# Altium footprint library WR-TBL_Pluggable Connector_5.08mm.PcbLib: 295 footprints (part 17 of 19)
Each footprint in its own frame and in the unit in brackets; x right, y up, seen from the top. Pads: shape width x height; smd on the part's side, far side on the other; paste and mask are expansions set on the pad; w line width, h text height; cw(c..) or ccw(c..) is an arc to the next point about the centre after c.
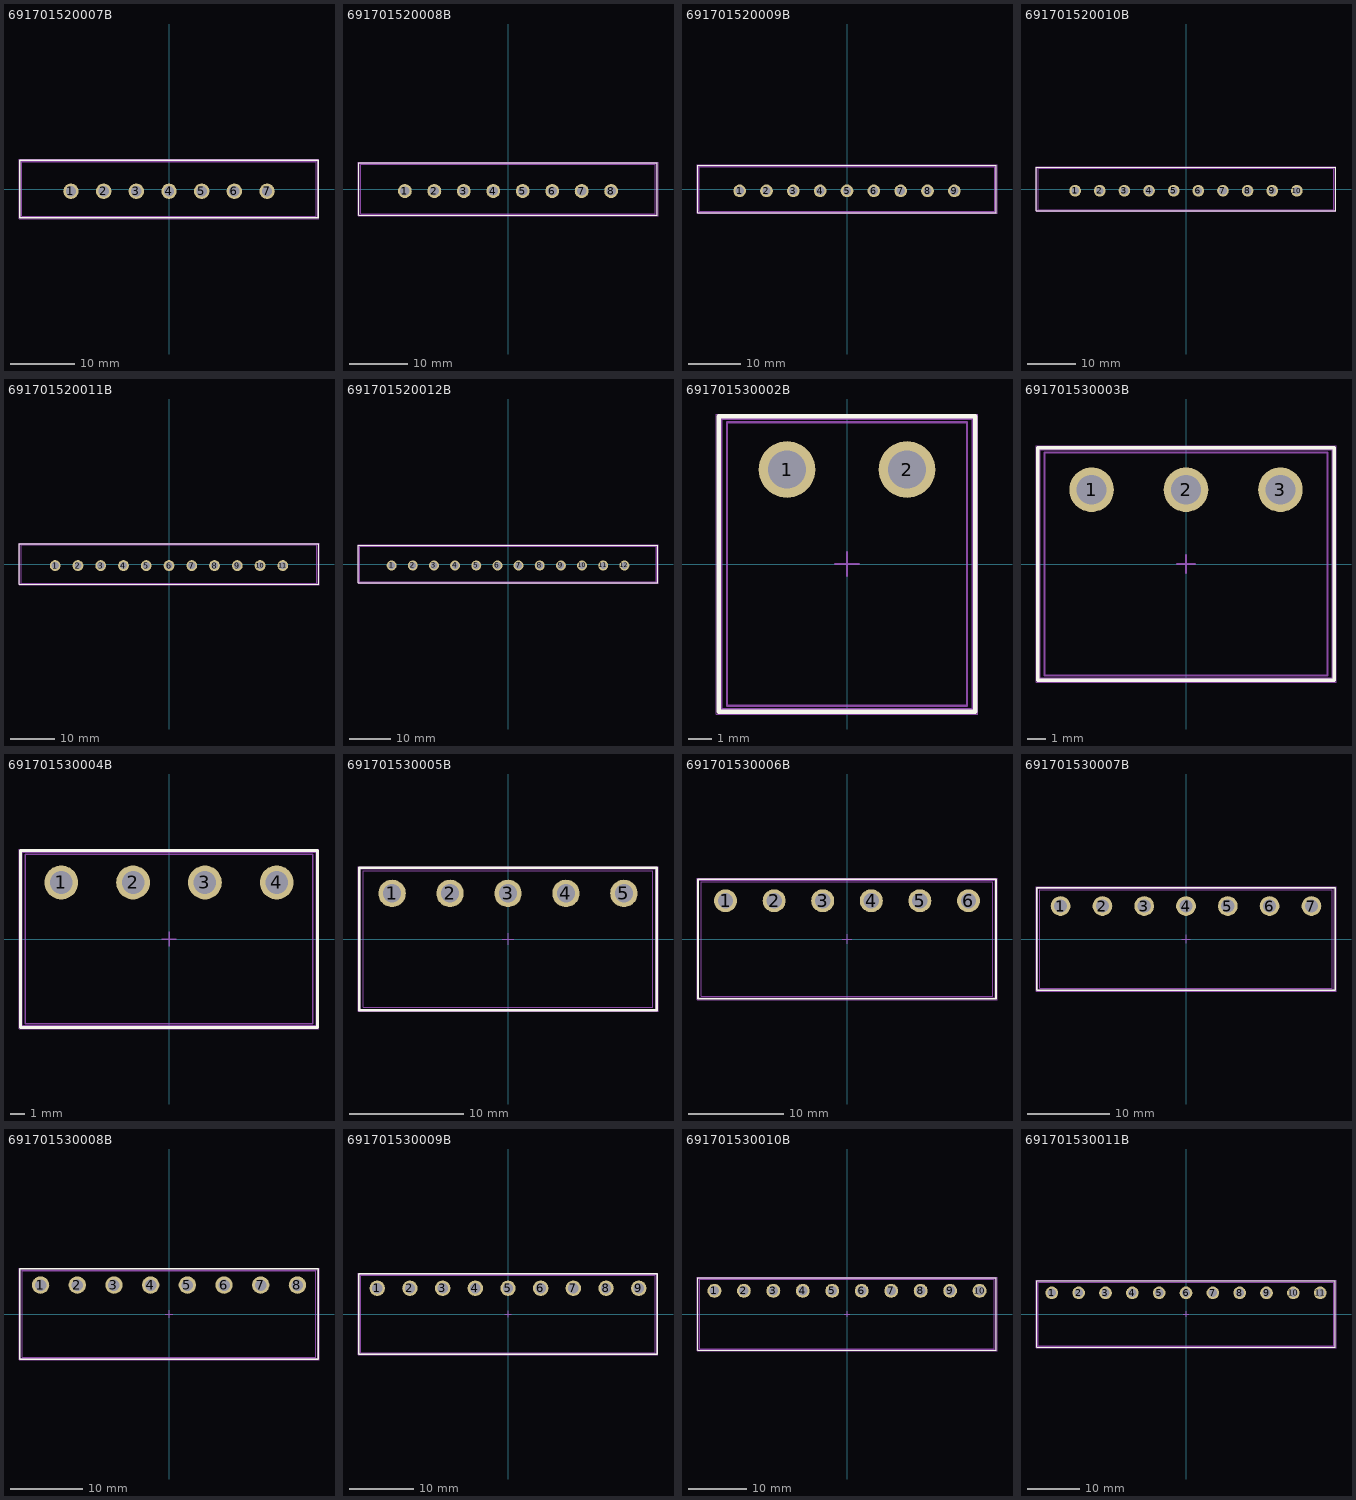
[diagram p16: the footprints below, top view; thin cyan lines are the x and y axes]

## 691701520007B [mm] "THR - 5,08mm - PCB Vertical Flange - 07p"
height 12
pads (7):
  round 2.4 hole 1.6: 1(-15.24,-0.35) 2(-10.16,-0.35) 3(-5.08,-0.35) 4(0,-0.35) 5(5.08,-0.35) 6(10.16,-0.35) 7(15.24,-0.35)
Top Overlay:
  lines w0.2: -23.21,-4.5 23.21,-4.5 23.21,4.5 -23.21,4.5 -23.21,-4.5
Top Paste:
  region: 13.24,1.5 17.24,1.5 17.24,-2.2 13.24,-2.2
  region: 8.16,1.5 12.16,1.5 12.16,-2.2 8.16,-2.2
  region: 3.08,1.5 7.08,1.5 7.08,-2.2 3.08,-2.2
  region: -2,1.5 2,1.5 2,-2.2 -2,-2.2
  region: -7.08,1.5 -3.08,1.5 -3.08,-2.2 -7.08,-2.2
  region: -12.16,1.5 -8.16,1.5 -8.16,-2.2 -12.16,-2.2
  region: -17.24,1.5 -13.24,1.5 -13.24,-2.2 -17.24,-2.2
Assembly Notes:
  text "Stencil thickness : 120 μm" at -5.156,-5.301 h1
Top Assembly:
  lines w0.1: -23.11,-4.4 23.11,-4.4 23.11,4.4 -23.11,4.4 -23.11,-4.4
Top Designator:
  text ".Designator" at -3.647,-0.357 h1
Top 3D Body:
  lines w0.1: -22.86,-4.25 22.86,-4.25 22.86,4.25 -22.86,4.25 -22.86,-4.25
Top Courtyard:
  lines w0.05: -23.31,-4.6 -23.31,4.6 23.31,4.6 23.31,-4.6 -23.31,-4.6
3D body "691701520007B.stp": height 12.11, standoff -2.5, extent -22.86,-4.25 22.86,4.25

## 691701520008B [mm] "THR - 5,08mm - PCB Vertical Flange - 08p"
height 12
pads (8):
  round 2.4 hole 1.6: 1(-17.78,-0.35) 2(-12.7,-0.35) 3(-7.62,-0.35) 4(-2.54,-0.35) 5(2.54,-0.35) 6(7.62,-0.35) 7(12.7,-0.35) 8(17.78,-0.35)
Top Overlay:
  lines w0.2: -25.75,-4.5 25.75,-4.5 25.75,4.5 -25.75,4.5 -25.75,-4.5
Top Paste:
  region: 15.78,1.5 19.78,1.5 19.78,-2.2 15.78,-2.2
  region: 10.7,1.5 14.7,1.5 14.7,-2.2 10.7,-2.2
  region: 5.62,1.5 9.62,1.5 9.62,-2.2 5.62,-2.2
  region: 0.54,1.5 4.54,1.5 4.54,-2.2 0.54,-2.2
  region: -4.54,1.5 -0.54,1.5 -0.54,-2.2 -4.54,-2.2
  region: -9.62,1.5 -5.62,1.5 -5.62,-2.2 -9.62,-2.2
  region: -14.7,1.5 -10.7,1.5 -10.7,-2.2 -14.7,-2.2
  region: -19.78,1.5 -15.78,1.5 -15.78,-2.2 -19.78,-2.2
Assembly Notes:
  text "Stencil thickness : 120 μm" at -5.156,-5.301 h1
Top Assembly:
  lines w0.1: -25.65,-4.4 25.65,-4.4 25.65,4.4 -25.65,4.4 -25.65,-4.4
Top Designator:
  text ".Designator" at -3.647,-0.357 h1
Top 3D Body:
  lines w0.1: -25.4,-4.25 25.4,-4.25 25.4,4.25 -25.4,4.25 -25.4,-4.25
Top Courtyard:
  lines w0.05: -25.85,-4.6 -25.85,4.6 25.85,4.6 25.85,-4.6 -25.85,-4.6
3D body "691701520008B.stp": height 12.11, standoff -2.5, extent -25.4,-4.25 25.4,4.25

## 691701520009B [mm] "THR - 5,08mm - PCB Vertical Flange - 09p"
height 12
pads (9):
  round 2.4 hole 1.6: 1(-20.32,-0.35) 2(-15.24,-0.35) 3(-10.16,-0.35) 4(-5.08,-0.35) 5(0,-0.35) 6(5.08,-0.35) 7(10.16,-0.35) 8(15.24,-0.35) 9(20.32,-0.35)
Top Overlay:
  lines w0.2: -28.29,-4.5 28.29,-4.5 28.29,4.5 -28.29,4.5 -28.29,-4.5
Top Paste:
  region: -22.32,1.5 -18.32,1.5 -18.32,-2.2 -22.32,-2.2
  region: -17.24,1.5 -13.24,1.5 -13.24,-2.2 -17.24,-2.2
  region: -12.16,1.5 -8.16,1.5 -8.16,-2.2 -12.16,-2.2
  region: -7.08,1.5 -3.08,1.5 -3.08,-2.2 -7.08,-2.2
  region: -2,1.5 2,1.5 2,-2.2 -2,-2.2
  region: 3.08,1.5 7.08,1.5 7.08,-2.2 3.08,-2.2
  region: 8.16,1.5 12.16,1.5 12.16,-2.2 8.16,-2.2
  region: 13.24,1.5 17.24,1.5 17.24,-2.2 13.24,-2.2
  region: 18.32,1.5 22.32,1.5 22.32,-2.2 18.32,-2.2
Assembly Notes:
  text "Stencil thickness : 120 μm" at -5.156,-5.301 h1
Top Assembly:
  lines w0.1: -28.19,-4.4 28.19,-4.4 28.19,4.4 -28.19,4.4 -28.19,-4.4
Top Designator:
  text ".Designator" at -3.647,-0.357 h1
Top 3D Body:
  lines w0.1: -27.94,-4.25 27.94,-4.25 27.94,4.25 -27.94,4.25 -27.94,-4.25
Top Courtyard:
  lines w0.05: -28.39,-4.6 -28.39,4.6 28.39,4.6 28.39,-4.6 -28.39,-4.6
3D body "691701520009B.stp": height 12.11, standoff -2.5, extent -27.94,-4.25 27.94,4.25

## 691701520010B [mm] "THR - 5,08mm - PCB Vertical Flange - 10p"
height 12
pads (10):
  round 2.4 hole 1.6: 1(-22.86,-0.35) 2(-17.78,-0.35) 3(-12.7,-0.35) 4(-7.62,-0.35) 5(-2.54,-0.35) 6(2.54,-0.35) 7(7.62,-0.35) 8(12.7,-0.35) 9(17.78,-0.35) 10(22.86,-0.35)
Top Overlay:
  lines w0.2: -30.83,-4.5 30.83,-4.5 30.83,4.5 -30.83,4.5 -30.83,-4.5
Top Paste:
  region: -24.86,1.5 -20.86,1.5 -20.86,-2.2 -24.86,-2.2
  region: -19.78,1.5 -15.78,1.5 -15.78,-2.2 -19.78,-2.2
  region: -14.7,1.5 -10.7,1.5 -10.7,-2.2 -14.7,-2.2
  region: -9.62,1.5 -5.62,1.5 -5.62,-2.2 -9.62,-2.2
  region: -4.54,1.5 -0.54,1.5 -0.54,-2.2 -4.54,-2.2
  region: 0.54,1.5 4.54,1.5 4.54,-2.2 0.54,-2.2
  region: 5.62,1.5 9.62,1.5 9.62,-2.2 5.62,-2.2
  region: 10.7,1.5 14.7,1.5 14.7,-2.2 10.7,-2.2
  region: 15.78,1.5 19.78,1.5 19.78,-2.2 15.78,-2.2
  region: 20.86,1.5 24.86,1.5 24.86,-2.2 20.86,-2.2
Assembly Notes:
  text "Stencil thickness : 120 μm" at -5.156,-5.301 h1
Top Assembly:
  lines w0.1: -30.73,-4.4 30.73,-4.4 30.73,4.4 -30.73,4.4 -30.73,-4.4
Top Designator:
  text ".Designator" at -3.647,-0.357 h1
Top 3D Body:
  lines w0.1: -30.48,-4.25 30.48,-4.25 30.48,4.25 -30.48,4.25 -30.48,-4.25
Top Courtyard:
  lines w0.05: -30.93,-4.6 -30.93,4.6 30.93,4.6 30.93,-4.6 -30.93,-4.6
3D body "691701520010B.stp": height 12.11, standoff -2.5, extent -30.48,-4.25 30.48,4.25

## 691701520011B [mm] "THR - 5,08mm - PCB Vertical Flange - 11p"
height 12
pads (11):
  round 2.4 hole 1.6: 1(-25.4,-0.35) 2(-20.32,-0.35) 3(-15.24,-0.35) 4(-10.16,-0.35) 5(-5.08,-0.35) 6(0,-0.35) 7(5.08,-0.35) 8(10.16,-0.35) 9(15.24,-0.35) 10(20.32,-0.35) 11(25.4,-0.35)
Top Overlay:
  lines w0.2: -33.37,-4.5 33.37,-4.5 33.37,4.5 -33.37,4.5 -33.37,-4.5
Top Paste:
  region: -27.4,1.5 -23.4,1.5 -23.4,-2.2 -27.4,-2.2
  region: -22.32,1.5 -18.32,1.5 -18.32,-2.2 -22.32,-2.2
  region: -17.24,1.5 -13.24,1.5 -13.24,-2.2 -17.24,-2.2
  region: -12.16,1.5 -8.16,1.5 -8.16,-2.2 -12.16,-2.2
  region: -7.08,1.5 -3.08,1.5 -3.08,-2.2 -7.08,-2.2
  region: -2,1.5 2,1.5 2,-2.2 -2,-2.2
  region: 3.08,1.5 7.08,1.5 7.08,-2.2 3.08,-2.2
  region: 8.16,1.5 12.16,1.5 12.16,-2.2 8.16,-2.2
  region: 13.24,1.5 17.24,1.5 17.24,-2.2 13.24,-2.2
  region: 18.32,1.5 22.32,1.5 22.32,-2.2 18.32,-2.2
  region: 23.4,1.5 27.4,1.5 27.4,-2.2 23.4,-2.2
Assembly Notes:
  text "Stencil thickness : 120 μm" at -5.156,-5.301 h1
Top Assembly:
  lines w0.1: -33.27,-4.4 33.27,-4.4 33.27,4.4 -33.27,4.4 -33.27,-4.4
Top Designator:
  text ".Designator" at -3.647,-0.357 h1
Top 3D Body:
  lines w0.1: -33.02,-4.25 33.02,-4.25 33.02,4.25 -33.02,4.25 -33.02,-4.25
Top Courtyard:
  lines w0.05: -33.47,-4.6 -33.47,4.6 33.47,4.6 33.47,-4.6 -33.47,-4.6
3D body "691701520011B.stp": height 12.11, standoff -2.5, extent -33.02,-4.25 33.02,4.25

## 691701520012B [mm] "THR - 5,08mm - PCB Vertical Flange - 12p"
height 12
pads (12):
  round 2.4 hole 1.6: 1(-27.94,-0.35) 2(-22.86,-0.35) 3(-17.78,-0.35) 4(-12.7,-0.35) 5(-7.62,-0.35) 6(-2.54,-0.35) 7(2.54,-0.35) 8(7.62,-0.35) 9(12.7,-0.35) 10(17.78,-0.35) 11(22.86,-0.35) 12(27.94,-0.35)
Top Overlay:
  lines w0.2: -35.91,-4.5 -35.91,4.5 35.91,4.5 35.91,-4.5 -35.91,-4.5
Top Paste:
  region: -29.94,1.5 -25.94,1.5 -25.94,-2.2 -29.94,-2.2
  region: -24.86,1.5 -20.86,1.5 -20.86,-2.2 -24.86,-2.2
  region: -19.78,1.5 -15.78,1.5 -15.78,-2.2 -19.78,-2.2
  region: -14.7,1.5 -10.7,1.5 -10.7,-2.2 -14.7,-2.2
  region: -9.62,1.5 -5.62,1.5 -5.62,-2.2 -9.62,-2.2
  region: -4.54,1.5 -0.54,1.5 -0.54,-2.2 -4.54,-2.2
  region: 0.54,1.5 4.54,1.5 4.54,-2.2 0.54,-2.2
  region: 5.62,1.5 9.62,1.5 9.62,-2.2 5.62,-2.2
  region: 10.7,1.5 14.7,1.5 14.7,-2.2 10.7,-2.2
  region: 15.78,1.5 19.78,1.5 19.78,-2.2 15.78,-2.2
  region: 20.86,1.5 24.86,1.5 24.86,-2.2 20.86,-2.2
  region: 25.94,1.5 29.94,1.5 29.94,-2.2 25.94,-2.2
Assembly Notes:
  text "Stencil thickness : 120 μm" at -5.156,-5.301 h1
Top Assembly:
  lines w0.1: -35.81,-4.4 -35.81,4.4 35.81,4.4 35.81,-4.4 -35.81,-4.4
Top Designator:
  text ".Designator" at -3.647,-0.357 h1
Top 3D Body:
  lines w0.1: -35.56,-4.25 -35.56,4.25 35.56,4.25 35.56,-4.25 -35.56,-4.25
Top Courtyard:
  lines w0.05: -36.01,-4.6 36.01,-4.6 36.01,4.6 -36.01,4.6 -36.01,-4.6
3D body "691701520012B.stp": height 12.11, standoff -2.5, extent -35.56,-4.25 35.56,4.25

## 691701530002B [mm] "THR - 5,08mm - PCB Horizontal Open - 02p"
height 8.4
pads (2):
  round 2.4 hole 1.6: 1(-2.54,4) 2(2.54,4)
Top Overlay:
  lines w0.2: -5.43,-6.25 5.43,-6.25 5.43,6.25 -5.43,6.25 -5.43,-6.25
Top Paste:
  region: -4.54,5.85 -0.54,5.85 -0.54,2.15 -4.54,2.15
  region: 0.54,5.85 4.54,5.85 4.54,2.15 0.54,2.15
Assembly Notes:
  text "Stencil thickness : 120 μm" at -5.156,-7.001 h1
Top Assembly:
  lines w0.1: -5.33,-6.15 -5.33,6.15 5.33,6.15 5.33,-6.15 -5.33,-6.15
Top Designator:
  text ".Designator" at -3.647,-0.357 h1
Top 3D Body:
  lines w0.1: -5.08,-6 5.08,-6 5.08,6 -5.08,6 -5.08,-6
Top Courtyard:
  lines w0.05: -5.53,-6.35 -5.53,6.35 5.53,6.35 5.53,-6.35 -5.53,-6.35
Top Component Center:
  lines w0.1: -0.5,0 0.5,0 ; 0,-0.5 0,0.5
3D body "691701530002B.stp": height 8.6, standoff -2.5, extent -5.1,-6 5.06,6

## 691701530003B [mm] "THR - 5,08mm - PCB Horizontal Open - 03p"
height 8.4
pads (3):
  round 2.4 hole 1.6: 1(-5.08,4) 2(0,4) 3(5.08,4)
Top Overlay:
  lines w0.2: -7.97,-6.25 7.97,-6.25 7.97,6.25 -7.97,6.25 -7.97,-6.25
Top Paste:
  region: 3.08,5.85 7.08,5.85 7.08,2.15 3.08,2.15
  region: -2,5.85 2,5.85 2,2.15 -2,2.15
  region: -7.08,5.85 -3.08,5.85 -3.08,2.15 -7.08,2.15
Assembly Notes:
  text "Stencil thickness : 120 μm" at -5.156,-7.001 h1
Top Assembly:
  lines w0.1: -7.87,-6.15 -7.87,6.15 7.87,6.15 7.87,-6.15 -7.87,-6.15
Top Designator:
  text ".Designator" at -3.647,-0.357 h1
Top 3D Body:
  lines w0.1: -7.62,-6 7.62,-6 7.62,6 -7.62,6 -7.62,-6
Top Courtyard:
  lines w0.05: -8.07,-6.35 -8.07,6.35 8.07,6.35 8.07,-6.35 -8.07,-6.35
Top Component Center:
  lines w0.1: -0.5,0 0.5,0 ; 0,-0.5 0,0.5
3D body "691701530003B.stp": height 8.6, standoff -2.5, extent -7.62,-6 7.62,6

## 691701530004B [mm] "THR - 5,08mm - PCB Horizontal Open - 04p"
height 8.4
pads (4):
  round 2.4 hole 1.6: 1(-7.62,4) 2(-2.54,4) 3(2.54,4) 4(7.62,4)
Top Overlay:
  lines w0.2: -10.51,-6.25 10.51,-6.25 10.51,6.25 -10.51,6.25 -10.51,-6.25
Top Paste:
  region: 5.62,5.85 9.62,5.85 9.62,2.15 5.62,2.15
  region: -9.62,5.85 -5.62,5.85 -5.62,2.15 -9.62,2.15
  region: -4.54,5.85 -0.54,5.85 -0.54,2.15 -4.54,2.15
  region: 0.54,5.85 4.54,5.85 4.54,2.15 0.54,2.15
Assembly Notes:
  text "Stencil thickness : 120 μm" at -5.156,-7.001 h1
Top Assembly:
  lines w0.1: -10.41,-6.15 -10.41,6.15 10.41,6.15 10.41,-6.15 -10.41,-6.15
Top Designator:
  text ".Designator" at -3.647,-0.357 h1
Top 3D Body:
  lines w0.1: -10.16,-6 10.16,-6 10.16,6 -10.16,6 -10.16,-6
Top Courtyard:
  lines w0.05: -10.61,-6.35 -10.61,6.35 10.61,6.35 10.61,-6.35 -10.61,-6.35
Top Component Center:
  lines w0.1: -0.5,0 0.5,0 ; 0,-0.5 0,0.5
3D body "691701530004B.stp": height 8.6, standoff -2.5, extent -10.16,-6 10.16,6

## 691701530005B [mm] "THR - 5,08mm - PCB Horizontal Open - 05p"
height 8.4
pads (5):
  round 2.4 hole 1.6: 1(-10.16,4) 2(-5.08,4) 3(0,4) 4(5.08,4) 5(10.16,4)
Top Overlay:
  lines w0.2: -13.05,-6.25 13.05,-6.25 13.05,6.25 -13.05,6.25 -13.05,-6.25
Top Paste:
  region: 8.16,5.85 12.16,5.85 12.16,2.15 8.16,2.15
  region: -2,5.85 2,5.85 2,2.15 -2,2.15
  region: -7.08,5.85 -3.08,5.85 -3.08,2.15 -7.08,2.15
  region: -12.16,5.85 -8.16,5.85 -8.16,2.15 -12.16,2.15
  region: 3.08,5.85 7.08,5.85 7.08,2.15 3.08,2.15
Assembly Notes:
  text "Stencil thickness : 120 μm" at -5.156,-7.001 h1
Top Assembly:
  lines w0.1: -12.95,-6.15 -12.95,6.15 12.95,6.15 12.95,-6.15 -12.95,-6.15
Top Designator:
  text ".Designator" at -3.647,-0.357 h1
Top 3D Body:
  lines w0.1: -12.7,-6 12.7,-6 12.7,6 -12.7,6 -12.7,-6
Top Courtyard:
  lines w0.05: -13.15,-6.35 -13.15,6.35 13.15,6.35 13.15,-6.35 -13.15,-6.35
Top Component Center:
  lines w0.1: -0.5,0 0.5,0 ; 0,-0.5 0,0.5
3D body "691701530005B.stp": height 8.6, standoff -2.5, extent -12.7,-6 12.7,6

## 691701530006B [mm] "THR - 5,08mm - PCB Horizontal Open - 06p"
height 8.4
pads (6):
  round 2.4 hole 1.6: 1(-12.7,4) 2(-7.62,4) 3(-2.54,4) 4(2.54,4) 5(7.62,4) 6(12.7,4)
Top Overlay:
  lines w0.2: -15.59,-6.25 15.59,-6.25 15.59,6.25 -15.59,6.25 -15.59,-6.25
Top Paste:
  region: 5.62,5.85 9.62,5.85 9.62,2.15 5.62,2.15
  region: -4.54,5.85 -0.54,5.85 -0.54,2.15 -4.54,2.15
  region: -9.62,5.85 -5.62,5.85 -5.62,2.15 -9.62,2.15
  region: -14.7,5.85 -10.7,5.85 -10.7,2.15 -14.7,2.15
  region: 0.54,5.85 4.54,5.85 4.54,2.15 0.54,2.15
  region: 10.7,5.85 14.7,5.85 14.7,2.15 10.7,2.15
Assembly Notes:
  text "Stencil thickness : 120 μm" at -5.156,-7.001 h1
Top Assembly:
  lines w0.1: -15.49,-6.15 -15.49,6.15 15.49,6.15 15.49,-6.15 -15.49,-6.15
Top Designator:
  text ".Designator" at -3.647,-0.357 h1
Top 3D Body:
  lines w0.1: -15.24,-6 15.24,-6 15.24,6 -15.24,6 -15.24,-6
Top Courtyard:
  lines w0.05: -15.69,-6.35 -15.69,6.35 15.69,6.35 15.69,-6.35 -15.69,-6.35
Top Component Center:
  lines w0.1: -0.5,0 0.5,0 ; 0,-0.5 0,0.5
3D body "691701530006B.stp": height 8.6, standoff -2.5, extent -15.24,-6 15.24,6

## 691701530007B [mm] "THR - 5,08mm - PCB Horizontal Open - 07p"
height 8.4
pads (7):
  round 2.4 hole 1.6: 1(-15.24,4) 2(-10.16,4) 3(-5.08,4) 4(0,4) 5(5.08,4) 6(10.16,4) 7(15.24,4)
Top Overlay:
  lines w0.2: -18.13,-6.25 18.13,-6.25 18.13,6.25 -18.13,6.25 -18.13,-6.25
Top Paste:
  region: 13.24,5.85 17.24,5.85 17.24,2.15 13.24,2.15
  region: 3.08,5.85 7.08,5.85 7.08,2.15 3.08,2.15
  region: -7.08,5.85 -3.08,5.85 -3.08,2.15 -7.08,2.15
  region: -12.16,5.85 -8.16,5.85 -8.16,2.15 -12.16,2.15
  region: -17.24,5.85 -13.24,5.85 -13.24,2.15 -17.24,2.15
  region: -2,5.85 2,5.85 2,2.15 -2,2.15
  region: 8.16,5.85 12.16,5.85 12.16,2.15 8.16,2.15
Assembly Notes:
  text "Stencil thickness : 120 μm" at -5.156,-7.001 h1
Top Assembly:
  lines w0.1: -18.03,-6.15 -18.03,6.15 18.03,6.15 18.03,-6.15 -18.03,-6.15
Top Designator:
  text ".Designator" at -3.647,-0.357 h1
Top 3D Body:
  lines w0.1: -17.78,-6 17.78,-6 17.78,6 -17.78,6 -17.78,-6
Top Courtyard:
  lines w0.05: -18.23,-6.35 -18.23,6.35 18.23,6.35 18.23,-6.35 -18.23,-6.35
Top Component Center:
  lines w0.1: -0.5,0 0.5,0 ; 0,-0.5 0,0.5
3D body "691701530007B.stp": height 8.6, standoff -2.5, extent -17.78,-6 17.78,6

## 691701530008B [mm] "THR - 5,08mm - PCB Horizontal Open - 08p"
height 8.4
pads (8):
  round 2.4 hole 1.6: 1(-17.78,4) 2(-12.7,4) 3(-7.62,4) 4(-2.54,4) 5(2.54,4) 6(7.62,4) 7(12.7,4) 8(17.78,4)
Top Overlay:
  lines w0.2: -20.67,-6.25 20.67,-6.25 20.67,6.25 -20.67,6.25 -20.67,-6.25
Top Paste:
  region: 5.62,5.85 9.62,5.85 9.62,2.15 5.62,2.15
  region: -4.54,5.85 -0.54,5.85 -0.54,2.15 -4.54,2.15
  region: -19.78,5.85 -15.78,5.85 -15.78,2.15 -19.78,2.15
  region: -14.7,5.85 -10.7,5.85 -10.7,2.15 -14.7,2.15
  region: -9.62,5.85 -5.62,5.85 -5.62,2.15 -9.62,2.15
  region: 0.54,5.85 4.54,5.85 4.54,2.15 0.54,2.15
  region: 10.7,5.85 14.7,5.85 14.7,2.15 10.7,2.15
  region: 15.78,5.85 19.78,5.85 19.78,2.15 15.78,2.15
Assembly Notes:
  text "Stencil thickness : 120 μm" at -5.156,-7.001 h1
Top Assembly:
  lines w0.1: -20.57,-6.15 -20.57,6.15 20.57,6.15 20.57,-6.15 -20.57,-6.15
Top Designator:
  text ".Designator" at -3.647,-0.357 h1
Top 3D Body:
  lines w0.1: -20.32,-6 20.32,-6 20.32,6 -20.32,6 -20.32,-6
Top Courtyard:
  lines w0.05: -20.77,-6.35 -20.77,6.35 20.77,6.35 20.77,-6.35 -20.77,-6.35
Top Component Center:
  lines w0.1: -0.5,0 0.5,0 ; 0,-0.5 0,0.5
3D body "691701530008B.stp": height 8.6, standoff -2.5, extent -20.32,-6 20.32,6

## 691701530009B [mm] "THR - 5,08mm - PCB Horizontal Open - 09p"
height 8.4
pads (9):
  round 2.4 hole 1.6: 1(-20.32,4) 2(-15.24,4) 3(-10.16,4) 4(-5.08,4) 5(0,4) 6(5.08,4) 7(10.16,4) 8(15.24,4) 9(20.32,4)
Top Overlay:
  lines w0.2: -23.21,-6.25 23.21,-6.25 23.21,6.25 -23.21,6.25 -23.21,-6.25
Top Paste:
  region: 18.32,5.85 22.32,5.85 22.32,2.15 18.32,2.15
  region: 13.24,5.85 17.24,5.85 17.24,2.15 13.24,2.15
  region: 8.16,5.85 12.16,5.85 12.16,2.15 8.16,2.15
  region: -2,5.85 2,5.85 2,2.15 -2,2.15
  region: -12.16,5.85 -8.16,5.85 -8.16,2.15 -12.16,2.15
  region: -17.24,5.85 -13.24,5.85 -13.24,2.15 -17.24,2.15
  region: -22.32,5.85 -18.32,5.85 -18.32,2.15 -22.32,2.15
  region: -7.08,5.85 -3.08,5.85 -3.08,2.15 -7.08,2.15
  region: 3.08,5.85 7.08,5.85 7.08,2.15 3.08,2.15
Assembly Notes:
  text "Stencil thickness : 120 μm" at -5.156,-7.001 h1
Top Assembly:
  lines w0.1: -23.11,-6.15 -23.11,6.15 23.11,6.15 23.11,-6.15 -23.11,-6.15
Top Designator:
  text ".Designator" at -3.647,-0.357 h1
Top 3D Body:
  lines w0.1: -22.86,-6 22.86,-6 22.86,6 -22.86,6 -22.86,-6
Top Courtyard:
  lines w0.05: -23.31,-6.35 -23.31,6.35 23.31,6.35 23.31,-6.35 -23.31,-6.35
Top Component Center:
  lines w0.1: -0.5,0 0.5,0 ; 0,-0.5 0,0.5
3D body "691701530009B.stp": height 8.6, standoff -2.5, extent -22.86,-6 22.86,6

## 691701530010B [mm] "THR - 5,08mm - PCB Horizontal Open - 10p"
height 8.4
pads (10):
  round 2.4 hole 1.6: 1(-22.86,4) 2(-17.78,4) 3(-12.7,4) 4(-7.62,4) 5(-2.54,4) 6(2.54,4) 7(7.62,4) 8(12.7,4) 9(17.78,4) 10(22.86,4)
Top Overlay:
  lines w0.2: -25.75,-6.25 25.75,-6.25 25.75,6.25 -25.75,6.25 -25.75,-6.25
Top Paste:
  region: 0.54,5.85 4.54,5.85 4.54,2.15 0.54,2.15
  region: -9.62,5.85 -5.62,5.85 -5.62,2.15 -9.62,2.15
  region: -24.86,5.85 -20.86,5.85 -20.86,2.15 -24.86,2.15
  region: -19.78,5.85 -15.78,5.85 -15.78,2.15 -19.78,2.15
  region: -14.7,5.85 -10.7,5.85 -10.7,2.15 -14.7,2.15
  region: -4.54,5.85 -0.54,5.85 -0.54,2.15 -4.54,2.15
  region: 5.62,5.85 9.62,5.85 9.62,2.15 5.62,2.15
  region: 10.7,5.85 14.7,5.85 14.7,2.15 10.7,2.15
  region: 15.78,5.85 19.78,5.85 19.78,2.15 15.78,2.15
  region: 20.86,5.85 24.86,5.85 24.86,2.15 20.86,2.15
Assembly Notes:
  text "Stencil thickness : 120 μm" at -5.156,-7.001 h1
Top Assembly:
  lines w0.1: -25.65,-6.15 -25.65,6.15 25.65,6.15 25.65,-6.15 -25.65,-6.15
Top Designator:
  text ".Designator" at -3.647,-0.357 h1
Top 3D Body:
  lines w0.1: -25.4,-6 25.4,-6 25.4,6 -25.4,6 -25.4,-6
Top Courtyard:
  lines w0.05: -25.85,-6.35 -25.85,6.35 25.85,6.35 25.85,-6.35 -25.85,-6.35
Top Component Center:
  lines w0.1: -0.5,0 0.5,0 ; 0,-0.5 0,0.5
3D body "691701530010B.stp": height 8.6, standoff -2.5, extent -25.4,-6 25.4,6

## 691701530011B [mm] "THR - 5,08mm - PCB Horizontal Open - 11p"
height 8.4
pads (11):
  round 2.4 hole 1.6: 1(-25.4,4) 2(-20.32,4) 3(-15.24,4) 4(-10.16,4) 5(-5.08,4) 6(0,4) 7(5.08,4) 8(10.16,4) 9(15.24,4) 10(20.32,4) 11(25.4,4)
Top Overlay:
  lines w0.2: -28.29,-6.25 28.29,-6.25 28.29,6.25 -28.29,6.25 -28.29,-6.25
Top Paste:
  region: 23.4,5.85 27.4,5.85 27.4,2.15 23.4,2.15
  region: 18.32,5.85 22.32,5.85 22.32,2.15 18.32,2.15
  region: 13.24,5.85 17.24,5.85 17.24,2.15 13.24,2.15
  region: 8.16,5.85 12.16,5.85 12.16,2.15 8.16,2.15
  region: 3.08,5.85 7.08,5.85 7.08,2.15 3.08,2.15
  region: -7.08,5.85 -3.08,5.85 -3.08,2.15 -7.08,2.15
  region: -17.24,5.85 -13.24,5.85 -13.24,2.15 -17.24,2.15
  region: -22.32,5.85 -18.32,5.85 -18.32,2.15 -22.32,2.15
  region: -27.4,5.85 -23.4,5.85 -23.4,2.15 -27.4,2.15
  region: -12.16,5.85 -8.16,5.85 -8.16,2.15 -12.16,2.15
  region: -2,5.85 2,5.85 2,2.15 -2,2.15
Assembly Notes:
  text "Stencil thickness : 120 μm" at -5.156,-7.001 h1
Top Assembly:
  lines w0.1: -28.19,-6.15 -28.19,6.15 28.19,6.15 28.19,-6.15 -28.19,-6.15
Top Designator:
  text ".Designator" at -3.647,-0.357 h1
Top 3D Body:
  lines w0.1: -27.94,-6 27.94,-6 27.94,6 -27.94,6 -27.94,-6
Top Courtyard:
  lines w0.05: -28.39,-6.35 -28.39,6.35 28.39,6.35 28.39,-6.35 -28.39,-6.35
Top Component Center:
  lines w0.1: -0.5,0 0.5,0 ; 0,-0.5 0,0.5
3D body "691701530011B.stp": height 8.6, standoff -2.5, extent -27.94,-6 27.94,6